# Altium schematic symbol library Interruptores.SchLib: 1 symbol
Pins are listed as number, name and electrical type; pins without a type are passive.

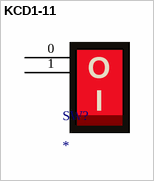
[diagram p0: symbol KCD1-11]

## KCD1-11
designator SW?
footprint KCD1-11
pins: 0, 1
text: O / I